# EAGLE library part PAKVI (library k1)
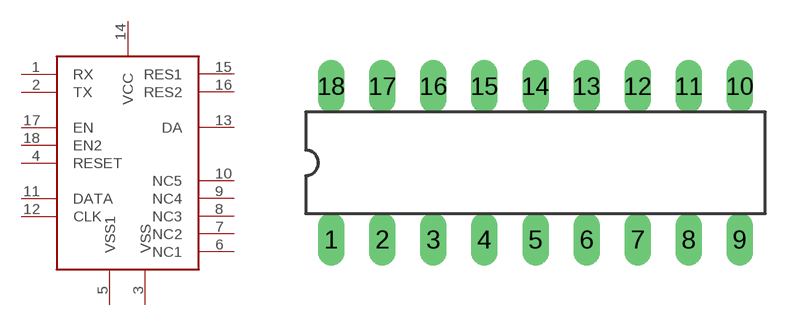
[diagram p3: symbol with the pads of DIL18; footprint DIL18]

Designator prefix -

## PAKVI  [DIL18]
1  RX  in
2  TX  out
3  VSS  pwr
4  RESET  in
5  VSS1  pwr
6  NC1  nc
7  NC2  nc
8  NC3  nc
9  NC4  nc
10  NC5  nc
11  DATA
12  CLK
13  DA  out
14  VCC  sup
15  RES1  in
16  RES2  in
17  EN  in
18  EN2  in

## Footprint DIL18 (pad centres in mm)
Dual In Line package type P
drill 0.813 long: 1 -10.16,-3.81; 2 -7.62,-3.81; 3 -5.08,-3.81; 4 -2.54,-3.81; 5 0,-3.81; 6 2.54,-3.81; 7 5.08,-3.81; 8 7.62,-3.81; 9 10.16,-3.81; 10 10.16,3.81; 11 7.62,3.81; 12 5.08,3.81; 13 2.54,3.81; 14 0,3.81; 15 -2.54,3.81; 16 -5.08,3.81; 17 -7.62,3.81; 18 -10.16,3.81